# Altium schematic symbol library P沟道防反MOS管_DMP6023LE-13.SCHLIB: 1 symbol
Pins are listed as number, name and electrical type; pins without a type are passive.

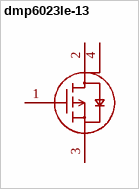
[diagram p0: symbol dmp6023le-13]

## dmp6023le-13
designator Q??  (value not drawn)
数量:1个P沟道;漏源电压(Vdss):60V;连续漏极电流(Id):7A;导通电阻(RDS(on)):35mΩ@4.5V;耗散功率(Pd):2W;阈值电压(Vgs(th)):3V;; Manufacturer: DIODES(美台); AddInBom: yes; ModelId: 925194bf9823436183a3e0b978a8d076; ModelName: SOT-223-4P_L6.5-W3.5-H1.6-LS7.0-P2.30; ModelTransform: 279.89794,255.905,0,180,0,0,-0.0005,-0.0005,0; Number: 1个P沟道; Drain to Source Voltage: 60V; Current - Continuous Drain(Id): 7A; Pd - Power Dissipation: 2W; Gate Threshold Voltage (Vgs(th)): 3V; Gate Charge(Qg): 53.1nC@10V; Input Capacitance(Ciss): 2.569nF; Reverse Transfer Capacitance (Crss@Vds): 143pF; Type: P沟道; Output Capacitance(Coss): 179pF; Symbol: DMP6023LE-13; LCSC Part Name: 1个P沟道 耐压:60V 电流:7A; SupplierPart: C154901; ManufacturerPart: DMP6023LE-13; Supplier Footprint: SOT-223; JLCPCB Part Class: Extended Part; Datasheet: https://item.szlcsc.com/datasheet/DMP6023LE-13/166243.html; Supplier: LCSC; ConvertToPcb: yes; FootprintName: SOT-223-4_L6.5-W3.5-P2.30-LS7.0-BR; RDS(on): 35mΩ@4.5V; Operating Temperature: -55℃~+150℃
footprint SOT-223-4_L6.5-W3.5-P2.30-LS7.0-BR
pins: 1 G, 2 D, 3 S, 4 D